# Altium footprint library conn.PcbLib: 101 footprints (part 7 of 7)
Each footprint in its own frame and in the unit in brackets; x right, y up, seen from the top. Pads: shape width x height; smd on the part's side, far side on the other; paste and mask are expansions set on the pad; w line width, h text height; cw(c..) or ccw(c..) is an arc to the next point about the centre after c.
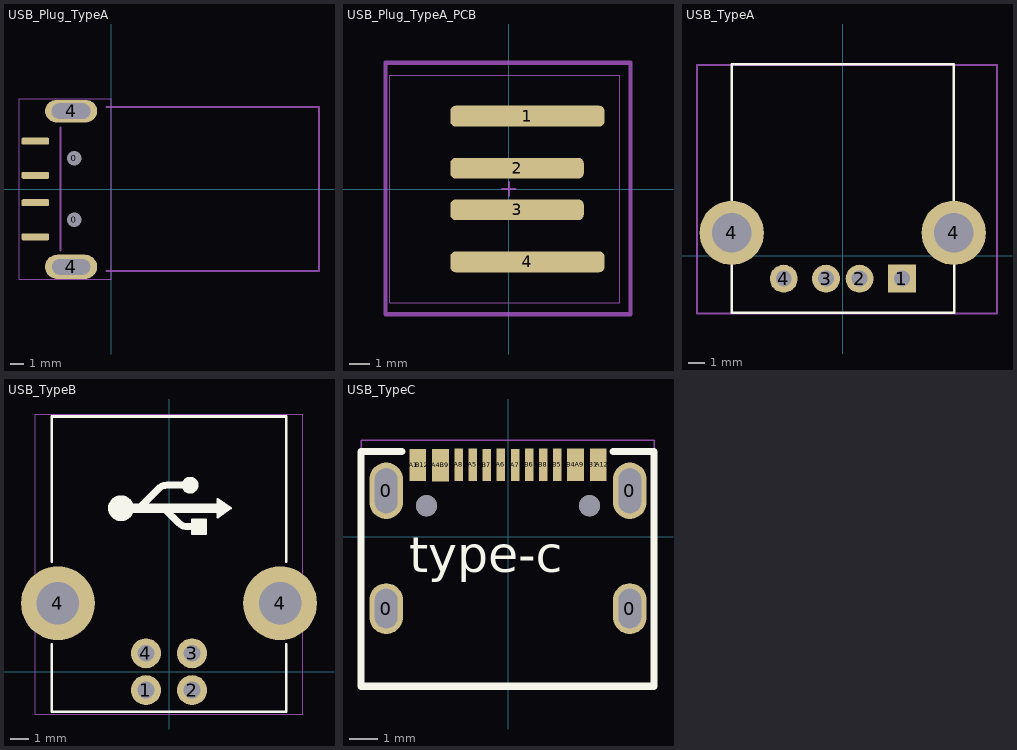
[diagram p6: the footprints below, top view; thin cyan lines are the x and y axes]

## USB_Plug_TypeA [mil]
height 177.17
pads (8):
  round 32 hole 42: 0(-106.3,-88.58) 0(-106.3,88.58)
  rrect50% 80x20 smd: 1(-218,137.8) 2(-218,39.37) 3(-218,-39.37) 4(-218,-137.8)
  oval 150x70 hole 45 slot 110 at 0 deg: 4(-115,-224)
  oval 150x65 hole 45 slot 111 at 0 deg: 4(-115,224)
Mechanical 13:
  lines w6: -145.67,-176.18 -145.67,176.18 ; -12.99,-236.22 598.43,-236.22 598.43,236.22 -12.99,236.22
Top Component:
  lines w2: -265,-260 -265,260 0,260 0,-260 -265,-260
  text ".Designator" at -132,34 h80
3D body "SW3dPS-USB-Male Port.STEP": height 70, standoff -117.5, extent -145.67,-236.37 576.08,236.37

## USB_Plug_TypeA_PCB [mm]
height 3.9
pads (4):
  rrect50% 7.41x1 smd: 1(0.897,3.5) 4(0.897,-3.5)
  rrect50% 6.41x1 smd: 2(0.397,1) 3(0.397,-1)
Mechanical 13:
  lines w0.051: -5.908,-6 5.842,-6 5.842,6 -5.908,6 -5.908,-6 ; -5.715,-5.461 -5.715,5.461 5.334,5.461 5.334,-5.461 -5.715,-5.461
  lines w0.1: -0.33,0 0.33,0 ; 0,-0.33 0,0.33
Top Component:
  lines w0.203: -5.918,-6.02 5.842,-6.02 5.842,6.071 -5.918,6.071 -5.918,-6.02
  text ".Designator" at -0.813,-0.559 h2.03

## USB_TypeA [mil]
pads (6):
  rect 65x65 hole 37: 1(138,-53.5)
  round 65 hole 37: 2(39.5,-53.5) 3(-39,-53.5) 4(-137.6,-53.5)
  round 150 hole 93: 4(-259,53.5) 4(259,53.5)
Top Overlay:
  lines w6: 259,53.5 259,446.5 -259,446.5 -259,53.5 -259,-133.5 260,-133.5 260,53.5
Top Component:
  lines w4: -340,-135 360,-135 360,445 -259,445 -340,445 -340,-135
  text ".Designator" at -36,186 h80
3D body "User Library-USB-A-01.step": height 274.23, standoff -164.75, extent -311.02,-98.5 311.03,440.87

## USB_TypeB [mm]
height 11.1
pads (6):
  round 1.626 hole 0.914 mask+0.025: 1(-1.25,-0.995) 2(1.25,-0.995) 3(1.25,1.005) 4(-1.25,1.005)
  round 4 hole 2.3 mask+0: 4(-6.02,3.715) 4(6.02,3.715)
Top Overlay:
  circle w0.508: c1.145,10.115 r0.2
  circle w0.889: c-2.605,8.865 r0.254
  region: 1.995,7.49 1.245,7.49 1.245,8.24 1.995,8.24
  region: 3.345,8.865 2.645,8.365 2.645,9.365
  lines w0.127: 1.245,7.49 1.995,7.49 1.995,8.24 1.245,8.24 1.245,7.49 ; 2.645,8.365 2.645,9.365 3.345,8.865 2.645,8.365
  lines w0.152: -6.35,1.495 -6.35,-2.159 6.35,-2.159 6.35,1.495 ; -6.35,5.969 -6.35,13.843 6.35,13.843 6.35,5.969
  lines w0.381: -1.558,8.927 -0.558,9.927 cw(c-0.105,9.474) -0.105,10.115 1.145,10.115 ; -0.208,8.802 0.542,8.052 ccw(c0.995,8.505) 0.995,7.865 1.245,7.865
  lines w0.508: -2.105,8.865 2.645,8.865
Top Component:
  lines w0.051: -7.239,-2.286 -7.239,13.97 7.239,13.97 7.239,-2.286 -7.239,-2.286
  text ".Designator" at -0.965,5.994 h2.03
3D body "c-0292304-01-b-3d.stp": height 11.5, standoff -3.93, extent -7.194,-1.705 7.194,13.995

## USB_TypeC [mm]
pads (22):
  oval 1.2x1.8 hole 0.8 slot 1.4 at 90 deg: 0(-4.32,-2.547) 0(4.32,-2.547)
  oval 1.2x2 hole 0.8 slot 1.6 at 90 deg: 0(-4.32,1.633) 0(4.32,1.633)
  rect 0.3x1.15 smd: A1(-3.35,2.546) A4(-2.55,2.543) A5(-1.25,2.547) A6(-0.25,2.547) A7(0.25,2.546) A8(-1.75,2.547) A9(2.55,2.547) A12(3.35,2.547) B1(3.05,2.547) B4(2.25,2.547) B5(1.75,2.547) B6(0.75,2.547) B7(-0.75,2.546) B8(1.25,2.547) B9(-2.25,2.543) B12(-3.05,2.546)
  round 0.75 hole 0.75 unplated: ""(-2.89,1.102) ""(2.89,1.102)
Top Overlay:
  lines w0.254: -3.762,3.03 -5.21,3.03 -5.21,-5.301 5.179,-5.301 5.179,3.03 3.731,3.03
  text "type-c" at -3.508,-1.263 h1.27
Top Component:
  lines w0.051: -5.207,-5.359 -5.207,3.429 5.182,3.429 5.182,-5.359 -5.207,-5.359
  text ".Designator" at -0.584,0.813 h2.03
3D body "HRO  TYPE-C-31-M-12.step": height 3.21, standoff -1, extent -4.473,-5.098 4.467,2.802